# Altium schematic symbol library WPME-FIRM.SchLib: 2 symbols
Pins are listed as number, name and electrical type; pins without a type are passive.

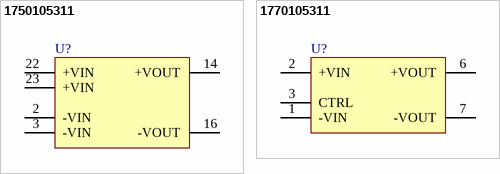
[diagram p0: symbols 1750105311 to 1770105311]

## 1750105311
designator U?  (value not drawn)
WPME-FIRM Fixed Isolated Regulator Module, THT, DIP-24, 5Vout, 6Wout; Manufacturer: Wurth Elektronik; Input Voltage Max: 36V; Isolation Voltage: 1500V; Output Power: 6W; Output Voltage: 5V; Type of Insulation: Functional; Manufacturer Part Number: 1750105311; Product Series: WPME-FIRM; ComponentLink1Description: Website Link; ComponentLink1URL: https://www.we-online.com; ComponentLink2Description: Datasheet Link; ComponentLink2URL: https://www.we-online.com/components/products/datasheet/1750105311; Mount: Through Hole; Operating Temperature Min: -40degC; Operating Temperature Max: 105degC; Packaging: Tube; Case/Size Code: DIP-24; Length: 32mm; Width: 20mm; Height: 10.8mm
footprint WPME-FIRM_DIP-24
pins: 2 -VIN, 3 -VIN, 14 +VOUT, 16 -VOUT, 22 +VIN, 23 +VIN

## 1770105311
designator U?  (value not drawn)
WPME-FIRM Fixed Isolated Regulator Module, THT, SIP-8, 5Vout, 6Wout; Manufacturer: Wurth Elektronik; Input Voltage Max: 36V; Isolation Voltage: 1600V; Output Power: 6W; Output Voltage: 5V; Type of Insulation: Functional; Manufacturer Part Number: 1770105311; Product Series: WPME-FIRM; ComponentLink1Description: Website Link; ComponentLink1URL: https://www.we-online.com; ComponentLink2Description: Datasheet Link; ComponentLink2URL: https://www.we-online.com/components/products/datasheet/1770105311; Mount: Through Hole; Operating Temperature Min: -40degC; Operating Temperature Max: 105degC; Packaging: Tube; Case/Size Code: SIP-8; Length: 22mm; Width: 9.5mm; Height: 12mm
footprint WPME-FIRM_SIP-8
pins: 1 -VIN, 2 +VIN, 3 CTRL, 6 +VOUT, 7 -VOUT